# Altium integrated library ERA2AEB101X.IntLib: 1 symbol
Pins are listed as number, name and electrical type; pins without a type are passive.

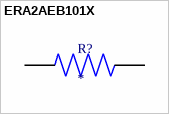
[diagram p0: symbol ERA2AEB101X]

## ERA2AEB101X
designator R?
MP: ERA2AEB101X; Availability: Unavailable; Package: None; Value: *; Price: None
footprint RES_ERA2AEB101X
pins: 1, 2